# Altium footprint library Package_DFN_QFN.PcbLib: 735 footprints (part 45 of 46)
Each footprint in its own frame and in the unit in brackets; x right, y up, seen from the top. Pads: shape width x height; smd on the part's side, far side on the other; paste and mask are expansions set on the pad; w line width, h text height; cw(c..) or ccw(c..) is an arc to the next point about the centre after c.
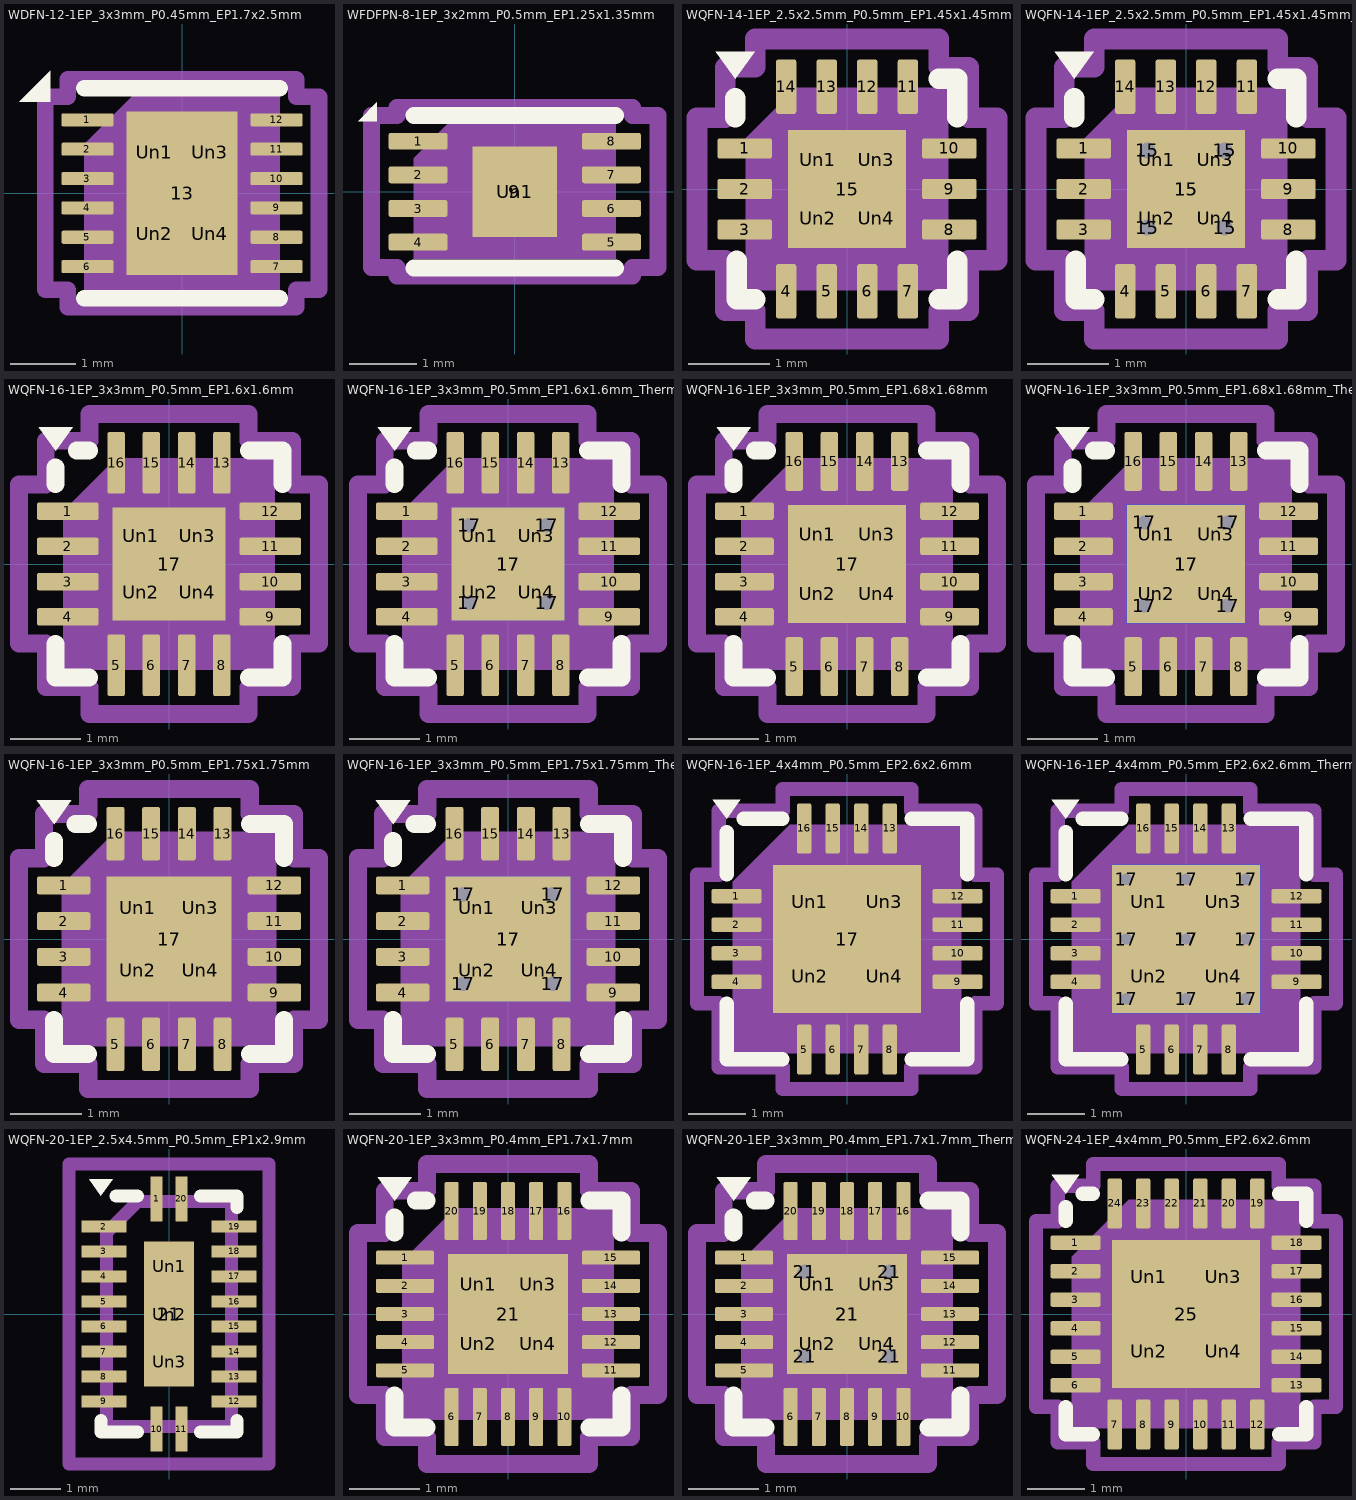
[diagram p44: the footprints below, top view; thin cyan lines are the x and y axes]

## WDFN-12-1EP_3x3mm_P0.45mm_EP1.7x2.5mm [mm] "WDFN-12-1EP_3x3mm_P0.45mm_EP1.7x2.5mm"
pads (17):
  rrect25% 0.8x0.2 smd: 1(-1.45,1.125) 2(-1.45,0.675) 3(-1.45,0.225) 4(-1.45,-0.225) 5(-1.45,-0.675) 6(-1.45,-1.125) 7(1.45,-1.125) 8(1.45,-0.675) 9(1.45,-0.225) 10(1.45,0.225) 11(1.45,0.675) 12(1.45,1.125)
  rect 1.7x2.5 smd: 13(0,0)
  rrect25% 0.69x1.01 on Top Paste: Un1(-0.425,0.625) Un2(-0.425,-0.625) Un3(0.425,0.625) Un4(0.425,-0.625)
F.SilkS:
  region: -2.02,1.4 -2.5,1.4 -2.02,1.88
  lines w0.254: -1.5,-1.61 1.5,-1.61 ; -1.5,1.61 1.5,1.61
Top Component Center:
  lines w0.127: -0.127,0 0.127,0 -0.127,0 ; 0,-0.127 0,0.127 0,-0.127
Top Assembly:
  region: 1.5,-1.5 -1.5,-1.5 -1.5,0.75 -0.75,1.5 1.5,1.5
Top Courtyard:
  lines w0.254: -2.1,-1.48 -1.75,-1.48 -1.75,-1.75 1.75,-1.75 1.75,-1.48 2.1,-1.48 2.1,1.48 1.75,1.48 1.75,1.75 -1.75,1.75 -1.75,1.48 -2.1,1.48 -2.1,-1.48
Top Designator:
  text ".Designator" at -3.43,-0.344 h1.52

## WFDFPN-8-1EP_3x2mm_P0.5mm_EP1.25x1.35mm [mm] "WFDFPN-8-1EP_3x2mm_P0.5mm_EP1.25x1.35mm"
pads (10):
  rrect25% 0.875x0.25 smd: 1(-1.438,0.75) 2(-1.438,0.25) 3(-1.438,-0.25) 4(-1.438,-0.75) 5(1.438,-0.75) 6(1.438,-0.25) 7(1.438,0.25) 8(1.438,0.75)
  rect 1.25x1.35 smd: 9(0,0)
  rrect25% 1.01x1.09 on Top Paste: Un1(0,0)
F.SilkS:
  region: -2.05,1.05 -2.33,1.05 -2.05,1.33
  lines w0.254: -1.5,-1.135 1.5,-1.135 ; -1.5,1.135 1.5,1.135
Top Component Center:
  lines w0.127: -0.127,0 0.127,0 -0.127,0 ; 0,-0.127 0,0.127 0,-0.127
Top Assembly:
  region: 1.5,-1 -1.5,-1 -1.5,0.5 -1,1 1.5,1
Top Courtyard:
  lines w0.254: -2.13,-1.13 -1.75,-1.13 -1.75,-1.25 1.75,-1.25 1.75,-1.13 2.13,-1.13 2.13,1.13 1.75,1.13 1.75,1.25 -1.75,1.25 -1.75,1.13 -2.13,1.13 -2.13,-1.13
Top Designator:
  text ".Designator" at -3.43,-0.344 h1.52

## WQFN-14-1EP_2.5x2.5mm_P0.5mm_EP1.45x1.45mm [mm] "WQFN-14-1EP_2.5x2.5mm_P0.5mm_EP1.45x1.45mm"
pads (19):
  rrect25% 0.675x0.25 smd: 1(-1.262,0.5) 2(-1.262,0) 3(-1.262,-0.5) 8(1.262,-0.5) 9(1.262,0) 10(1.262,0.5)
  rrect25% 0.25x0.675 smd: 4(-0.75,-1.262) 5(-0.25,-1.262) 6(0.25,-1.262) 7(0.75,-1.262) 11(0.75,1.262) 12(0.25,1.262) 13(-0.25,1.262) 14(-0.75,1.262)
  rect 1.45x1.45 smd: 15(0,0)
  rrect25% 0.58x0.58 on Top Paste: Un1(-0.36,0.36) Un2(-0.36,-0.36) Un3(0.36,0.36) Un4(0.36,-0.36)
F.SilkS:
  region: -1.38,1.36 -1.62,1.69 -1.14,1.69
  lines w0.254: -1.38,0.885 -1.38,1.12 ; -1.36,-0.885 -1.36,-1.36 -1.135,-1.36 ; 1.135,-1.36 1.36,-1.36 1.36,-0.885 ; 1.135,1.36 1.36,1.36 1.36,0.885
Top Component Center:
  lines w0.127: -0.127,0 0.127,0 -0.127,0 ; 0,-0.127 0,0.127 0,-0.127
Top Assembly:
  region: 1.25,-1.25 -1.25,-1.25 -1.25,0.625 -0.625,1.25 1.25,1.25
Top Courtyard:
  lines w0.254: -1.85,-0.88 -1.5,-0.88 -1.5,-1.5 -1.13,-1.5 -1.13,-1.85 1.13,-1.85 1.13,-1.5 1.5,-1.5 1.5,-0.88 1.85,-0.88 1.85,0.88 1.5,0.88 1.5,1.5 1.13,1.5 1.13,1.85 -1.13,1.85 -1.13,1.5 -1.5,1.5 -1.5,0.88 -1.85,0.88 -1.85,-0.88
Top Designator:
  text ".Designator" at -2.251,-0.226 h1

## WQFN-14-1EP_2.5x2.5mm_P0.5mm_EP1.45x1.45mm_ThermalVias [mm] "WQFN-14-1EP_2.5x2.5mm_P0.5mm_EP1.45x1.45mm_ThermalVias"
pads (24):
  rrect25% 0.675x0.25 smd: 1(-1.262,0.5) 2(-1.262,0) 3(-1.262,-0.5) 8(1.262,-0.5) 9(1.262,0) 10(1.262,0.5)
  rrect25% 0.25x0.675 smd: 4(-0.75,-1.262) 5(-0.25,-1.262) 6(0.25,-1.262) 7(0.75,-1.262) 11(0.75,1.262) 12(0.25,1.262) 13(-0.25,1.262) 14(-0.75,1.262)
  round 0.5 hole 0.2: 15(-0.475,-0.475) 15(-0.475,0.475) 15(0.475,-0.475) 15(0.475,0.475)
  rect 1.45x1.45 smd: 15(0,0)
  rect 1.45x1.45 smd far side: 15(0,0)
  rrect25% 0.61x0.61 on Top Paste: Un1(-0.36,0.36) Un2(-0.36,-0.36) Un3(0.36,0.36) Un4(0.36,-0.36)
F.SilkS:
  region: -1.38,1.36 -1.62,1.69 -1.14,1.69
  lines w0.254: -1.38,0.885 -1.38,1.12 ; -1.36,-0.885 -1.36,-1.36 -1.135,-1.36 ; 1.135,-1.36 1.36,-1.36 1.36,-0.885 ; 1.135,1.36 1.36,1.36 1.36,0.885
Top Component Center:
  lines w0.127: -0.127,0 0.127,0 -0.127,0 ; 0,-0.127 0,0.127 0,-0.127
Top Assembly:
  region: 1.25,-1.25 -1.25,-1.25 -1.25,0.625 -0.625,1.25 1.25,1.25
Top Courtyard:
  lines w0.254: -1.85,-0.88 -1.5,-0.88 -1.5,-1.5 -1.13,-1.5 -1.13,-1.85 1.13,-1.85 1.13,-1.5 1.5,-1.5 1.5,-0.88 1.85,-0.88 1.85,0.88 1.5,0.88 1.5,1.5 1.13,1.5 1.13,1.85 -1.13,1.85 -1.13,1.5 -1.5,1.5 -1.5,0.88 -1.85,0.88 -1.85,-0.88
Top Designator:
  text ".Designator" at -3.43,-0.344 h1.52

## WQFN-16-1EP_3x3mm_P0.5mm_EP1.6x1.6mm [mm] "WQFN-16-1EP_3x3mm_P0.5mm_EP1.6x1.6mm"
pads (21):
  rrect25% 0.875x0.25 smd: 1(-1.438,0.75) 2(-1.438,0.25) 3(-1.438,-0.25) 4(-1.438,-0.75) 9(1.438,-0.75) 10(1.438,-0.25) 11(1.438,0.25) 12(1.438,0.75)
  rrect25% 0.25x0.875 smd: 5(-0.75,-1.438) 6(-0.25,-1.438) 7(0.25,-1.438) 8(0.75,-1.438) 13(0.75,1.438) 14(0.25,1.438) 15(-0.25,1.438) 16(-0.75,1.438)
  rect 1.6x1.6 smd: 17(0,0)
  rrect25% 0.64x0.64 on Top Paste: Un1(-0.4,0.4) Un2(-0.4,-0.4) Un3(0.4,0.4) Un4(0.4,-0.4)
F.SilkS:
  region: -1.61,1.61 -1.85,1.94 -1.37,1.94
  lines w0.254: -1.61,-1.135 -1.61,-1.61 -1.135,-1.61 ; -1.61,1.135 -1.61,1.37 ; -1.31,1.61 -1.135,1.61 ; 1.135,-1.61 1.61,-1.61 1.61,-1.135 ; 1.135,1.61 1.61,1.61 1.61,1.135
Top Component Center:
  lines w0.127: -0.127,0 0.127,0 -0.127,0 ; 0,-0.127 0,0.127 0,-0.127
Top Assembly:
  region: 1.5,-1.5 -1.5,-1.5 -1.5,0.75 -0.75,1.5 1.5,1.5
Top Courtyard:
  lines w0.254: -2.13,-1.13 -2.13,1.13 -1.75,1.13 -1.75,1.75 -1.13,1.75 -1.13,2.13 1.13,2.13 1.13,1.75 1.75,1.75 1.75,1.13 2.13,1.13 2.13,-1.13 1.75,-1.13 1.75,-1.75 1.13,-1.75 1.13,-2.13 -1.13,-2.13 -1.13,-1.75 -1.75,-1.75 -1.75,-1.13 -2.13,-1.13
Top Designator:
  text ".Designator" at -3.43,-0.344 h1.52
3D body "WQFN-16-1EP_3x3mm_P0.5mm_EP1.6x1.6mm.step": height 0.8, standoff 0, extent -1.5,-1.5 1.5,1.5

## WQFN-16-1EP_3x3mm_P0.5mm_EP1.6x1.6mm_ThermalVias [mm] "WQFN-16-1EP_3x3mm_P0.5mm_EP1.6x1.6mm_ThermalVias"
pads (26):
  rrect25% 0.875x0.25 smd: 1(-1.438,0.75) 2(-1.438,0.25) 3(-1.438,-0.25) 4(-1.438,-0.75) 9(1.438,-0.75) 10(1.438,-0.25) 11(1.438,0.25) 12(1.438,0.75)
  rrect25% 0.25x0.875 smd: 5(-0.75,-1.438) 6(-0.25,-1.438) 7(0.25,-1.438) 8(0.75,-1.438) 13(0.75,1.438) 14(0.25,1.438) 15(-0.25,1.438) 16(-0.75,1.438)
  round 0.5 hole 0.2: 17(-0.55,-0.55) 17(-0.55,0.55) 17(0.55,-0.55) 17(0.55,0.55)
  rect 1.6x1.6 smd: 17(0,0)
  rect 1.6x1.6 smd far side: 17(0,0)
  rrect25% 0.69x0.69 on Top Paste: Un1(-0.4,0.4) Un2(-0.4,-0.4) Un3(0.4,0.4) Un4(0.4,-0.4)
F.SilkS:
  region: -1.61,1.61 -1.85,1.94 -1.37,1.94
  lines w0.254: -1.61,-1.135 -1.61,-1.61 -1.135,-1.61 ; -1.61,1.135 -1.61,1.37 ; -1.31,1.61 -1.135,1.61 ; 1.135,-1.61 1.61,-1.61 1.61,-1.135 ; 1.135,1.61 1.61,1.61 1.61,1.135
Top Component Center:
  lines w0.127: -0.127,0 0.127,0 -0.127,0 ; 0,-0.127 0,0.127 0,-0.127
Top Assembly:
  region: 1.5,-1.5 -1.5,-1.5 -1.5,0.75 -0.75,1.5 1.5,1.5
Top Courtyard:
  lines w0.254: -2.13,-1.13 -1.75,-1.13 -1.75,-1.75 -1.13,-1.75 -1.13,-2.13 1.13,-2.13 1.13,-1.75 1.75,-1.75 1.75,-1.13 2.13,-1.13 2.13,1.13 1.75,1.13 1.75,1.75 1.13,1.75 1.13,2.13 -1.13,2.13 -1.13,1.75 -1.75,1.75 -1.75,1.13 -2.13,1.13 -2.13,-1.13
Top Designator:
  text ".Designator" at -3.43,-0.344 h1.52
3D body "WQFN-16-1EP_3x3mm_P0.5mm_EP1.6x1.6mm.step": height 0.8, standoff 0, extent -1.5,-1.5 1.5,1.5

## WQFN-16-1EP_3x3mm_P0.5mm_EP1.68x1.68mm [mm] "WQFN-16-1EP_3x3mm_P0.5mm_EP1.68x1.68mm"
pads (21):
  rrect25% 0.835x0.25 smd: 1(-1.458,0.75) 2(-1.458,0.25) 3(-1.458,-0.25) 4(-1.458,-0.75) 9(1.458,-0.75) 10(1.458,-0.25) 11(1.458,0.25) 12(1.458,0.75)
  rrect25% 0.25x0.835 smd: 5(-0.75,-1.458) 6(-0.25,-1.458) 7(0.25,-1.458) 8(0.75,-1.458) 13(0.75,1.458) 14(0.25,1.458) 15(-0.25,1.458) 16(-0.75,1.458)
  rect 1.68x1.68 smd: 17(0,0)
  rrect25% 0.68x0.68 on Top Paste: Un1(-0.42,0.42) Un2(-0.42,-0.42) Un3(0.42,0.42) Un4(0.42,-0.42)
F.SilkS:
  region: -1.61,1.61 -1.85,1.94 -1.37,1.94
  lines w0.254: -1.61,-1.135 -1.61,-1.61 -1.135,-1.61 ; -1.61,1.135 -1.61,1.37 ; -1.31,1.61 -1.135,1.61 ; 1.135,-1.61 1.61,-1.61 1.61,-1.135 ; 1.135,1.61 1.61,1.61 1.61,1.135
Top Component Center:
  lines w0.127: -0.127,0 0.127,0 -0.127,0 ; 0,-0.127 0,0.127 0,-0.127
Top Assembly:
  region: 1.5,-1.5 -1.5,-1.5 -1.5,0.75 -0.75,1.5 1.5,1.5
Top Courtyard:
  lines w0.254: -2.13,-1.13 -1.75,-1.13 -1.75,-1.75 -1.13,-1.75 -1.13,-2.13 1.13,-2.13 1.13,-1.75 1.75,-1.75 1.75,-1.13 2.13,-1.13 2.13,1.13 1.75,1.13 1.75,1.75 1.13,1.75 1.13,2.13 -1.13,2.13 -1.13,1.75 -1.75,1.75 -1.75,1.13 -2.13,1.13 -2.13,-1.13
Top Designator:
  text ".Designator" at -3.43,-0.344 h1.52
3D body "WQFN-16-1EP_3x3mm_P0.5mm_EP1.6x1.6mm.step": height 0.8, standoff 0, extent -1.5,-1.5 1.5,1.5

## WQFN-16-1EP_3x3mm_P0.5mm_EP1.68x1.68mm_ThermalVias [mm] "WQFN-16-1EP_3x3mm_P0.5mm_EP1.68x1.68mm_ThermalVias"
pads (26):
  rrect25% 0.835x0.25 smd: 1(-1.458,0.75) 2(-1.458,0.25) 3(-1.458,-0.25) 4(-1.458,-0.75) 9(1.458,-0.75) 10(1.458,-0.25) 11(1.458,0.25) 12(1.458,0.75)
  rrect25% 0.25x0.835 smd: 5(-0.75,-1.458) 6(-0.25,-1.458) 7(0.25,-1.458) 8(0.75,-1.458) 13(0.75,1.458) 14(0.25,1.458) 15(-0.25,1.458) 16(-0.75,1.458)
  round 0.5 hole 0.2: 17(-0.59,-0.59) 17(-0.59,0.59) 17(0.59,-0.59) 17(0.59,0.59)
  rect 1.68x1.68 smd: 17(0,0)
  rect 1.68x1.68 smd far side: 17(0,0)
  rrect25% 0.73x0.73 on Top Paste: Un1(-0.42,0.42) Un2(-0.42,-0.42) Un3(0.42,0.42) Un4(0.42,-0.42)
F.SilkS:
  region: -1.61,1.61 -1.85,1.94 -1.37,1.94
  lines w0.254: -1.61,-1.135 -1.61,-1.61 -1.135,-1.61 ; -1.61,1.135 -1.61,1.37 ; -1.31,1.61 -1.135,1.61 ; 1.135,-1.61 1.61,-1.61 1.61,-1.135 ; 1.135,1.61 1.61,1.61 1.61,1.135
Top Component Center:
  lines w0.127: -0.127,0 0.127,0 -0.127,0 ; 0,-0.127 0,0.127 0,-0.127
Top Assembly:
  region: 1.5,-1.5 -1.5,-1.5 -1.5,0.75 -0.75,1.5 1.5,1.5
Top Courtyard:
  lines w0.254: -2.13,-1.13 -1.75,-1.13 -1.75,-1.75 -1.13,-1.75 -1.13,-2.13 1.13,-2.13 1.13,-1.75 1.75,-1.75 1.75,-1.13 2.13,-1.13 2.13,1.13 1.75,1.13 1.75,1.75 1.13,1.75 1.13,2.13 -1.13,2.13 -1.13,1.75 -1.75,1.75 -1.75,1.13 -2.13,1.13 -2.13,-1.13
Top Designator:
  text ".Designator" at -3.43,-0.344 h1.52
3D body "WQFN-16-1EP_3x3mm_P0.5mm_EP1.6x1.6mm.step": height 0.8, standoff 0, extent -1.5,-1.5 1.5,1.5

## WQFN-16-1EP_3x3mm_P0.5mm_EP1.75x1.75mm [mm] "WQFN-16-1EP_3x3mm_P0.5mm_EP1.75x1.75mm"
pads (21):
  rrect25% 0.75x0.25 smd: 1(-1.475,0.75) 2(-1.475,0.25) 3(-1.475,-0.25) 4(-1.475,-0.75) 9(1.475,-0.75) 10(1.475,-0.25) 11(1.475,0.25) 12(1.475,0.75)
  rrect25% 0.25x0.75 smd: 5(-0.75,-1.475) 6(-0.25,-1.475) 7(0.25,-1.475) 8(0.75,-1.475) 13(0.75,1.475) 14(0.25,1.475) 15(-0.25,1.475) 16(-0.75,1.475)
  rect 1.75x1.75 smd: 17(0,0)
  rrect25% 0.71x0.71 on Top Paste: Un1(-0.44,0.44) Un2(-0.44,-0.44) Un3(0.44,0.44) Un4(0.44,-0.44)
F.SilkS:
  region: -1.61,1.61 -1.85,1.94 -1.37,1.94
  lines w0.254: -1.61,-1.135 -1.61,-1.61 -1.135,-1.61 ; -1.61,1.135 -1.61,1.37 ; -1.31,1.61 -1.135,1.61 ; 1.135,-1.61 1.61,-1.61 1.61,-1.135 ; 1.135,1.61 1.61,1.61 1.61,1.135
Top Component Center:
  lines w0.127: -0.127,0 0.127,0 -0.127,0 ; 0,-0.127 0,0.127 0,-0.127
Top Assembly:
  region: 1.5,-1.5 -1.5,-1.5 -1.5,0.75 -0.75,1.5 1.5,1.5
Top Courtyard:
  lines w0.254: -2.1,-1.13 -1.75,-1.13 -1.75,-1.75 -1.13,-1.75 -1.13,-2.1 1.13,-2.1 1.13,-1.75 1.75,-1.75 1.75,-1.13 2.1,-1.13 2.1,1.13 1.75,1.13 1.75,1.75 1.13,1.75 1.13,2.1 -1.13,2.1 -1.13,1.75 -1.75,1.75 -1.75,1.13 -2.1,1.13 -2.1,-1.13
Top Designator:
  text ".Designator" at -3.43,-0.344 h1.52
3D body "WQFN-16-1EP_3x3mm_P0.5mm_EP1.6x1.6mm.step": height 0.8, standoff 0, extent -1.5,-1.5 1.5,1.5

## WQFN-16-1EP_3x3mm_P0.5mm_EP1.75x1.75mm_ThermalVias [mm] "WQFN-16-1EP_3x3mm_P0.5mm_EP1.75x1.75mm_ThermalVias"
pads (26):
  rrect25% 0.75x0.25 smd: 1(-1.475,0.75) 2(-1.475,0.25) 3(-1.475,-0.25) 4(-1.475,-0.75) 9(1.475,-0.75) 10(1.475,-0.25) 11(1.475,0.25) 12(1.475,0.75)
  rrect25% 0.25x0.75 smd: 5(-0.75,-1.475) 6(-0.25,-1.475) 7(0.25,-1.475) 8(0.75,-1.475) 13(0.75,1.475) 14(0.25,1.475) 15(-0.25,1.475) 16(-0.75,1.475)
  round 0.5 hole 0.2: 17(-0.625,-0.625) 17(-0.625,0.625) 17(0.625,-0.625) 17(0.625,0.625)
  rect 1.75x1.75 smd: 17(0,0)
  rect 1.75x1.75 smd far side: 17(0,0)
  rrect25% 0.76x0.76 on Top Paste: Un1(-0.44,0.44) Un2(-0.44,-0.44) Un3(0.44,0.44) Un4(0.44,-0.44)
F.SilkS:
  region: -1.61,1.61 -1.85,1.94 -1.37,1.94
  lines w0.254: -1.61,-1.135 -1.61,-1.61 -1.135,-1.61 ; -1.61,1.135 -1.61,1.37 ; -1.31,1.61 -1.135,1.61 ; 1.135,-1.61 1.61,-1.61 1.61,-1.135 ; 1.135,1.61 1.61,1.61 1.61,1.135
Top Component Center:
  lines w0.127: -0.127,0 0.127,0 -0.127,0 ; 0,-0.127 0,0.127 0,-0.127
Top Assembly:
  region: 1.5,-1.5 -1.5,-1.5 -1.5,0.75 -0.75,1.5 1.5,1.5
Top Courtyard:
  lines w0.254: -2.1,-1.13 -1.75,-1.13 -1.75,-1.75 -1.13,-1.75 -1.13,-2.1 1.13,-2.1 1.13,-1.75 1.75,-1.75 1.75,-1.13 2.1,-1.13 2.1,1.13 1.75,1.13 1.75,1.75 1.13,1.75 1.13,2.1 -1.13,2.1 -1.13,1.75 -1.75,1.75 -1.75,1.13 -2.1,1.13 -2.1,-1.13
Top Designator:
  text ".Designator" at -3.43,-0.344 h1.52
3D body "WQFN-16-1EP_3x3mm_P0.5mm_EP1.6x1.6mm.step": height 0.8, standoff 0, extent -1.5,-1.5 1.5,1.5

## WQFN-16-1EP_4x4mm_P0.5mm_EP2.6x2.6mm [mm] "WQFN-16-1EP_4x4mm_P0.5mm_EP2.6x2.6mm"
pads (21):
  rrect25% 0.875x0.25 smd: 1(-1.937,0.75) 2(-1.937,0.25) 3(-1.937,-0.25) 4(-1.937,-0.75) 9(1.937,-0.75) 10(1.937,-0.25) 11(1.937,0.25) 12(1.937,0.75)
  rrect25% 0.25x0.875 smd: 5(-0.75,-1.937) 6(-0.25,-1.937) 7(0.25,-1.937) 8(0.75,-1.937) 13(0.75,1.937) 14(0.25,1.937) 15(-0.25,1.937) 16(-0.75,1.937)
  rect 2.6x2.6 smd: 17(0,0)
  rrect24% 1.05x1.05 on Top Paste: Un1(-0.65,0.65) Un2(-0.65,-0.65) Un3(0.65,0.65) Un4(0.65,-0.65)
F.SilkS:
  region: -2.11,2.11 -2.35,2.44 -1.87,2.44
  lines w0.254: -2.11,-1.135 -2.11,-2.11 -1.135,-2.11 ; -2.11,1.135 -2.11,1.87 ; -1.81,2.11 -1.135,2.11 ; 1.135,-2.11 2.11,-2.11 2.11,-1.135 ; 1.135,2.11 2.11,2.11 2.11,1.135
Top Component Center:
  lines w0.127: -0.127,0 0.127,0 -0.127,0 ; 0,-0.127 0,0.127 0,-0.127
Top Assembly:
  region: 2,-2 -2,-2 -2,1 -1,2 2,2
Top Courtyard:
  lines w0.254: -2.63,-1.13 -2.25,-1.13 -2.25,-2.25 -1.13,-2.25 -1.13,-2.63 1.13,-2.63 1.13,-2.25 2.25,-2.25 2.25,-1.13 2.63,-1.13 2.63,1.13 2.25,1.13 2.25,2.25 1.13,2.25 1.13,2.63 -1.13,2.63 -1.13,2.25 -2.25,2.25 -2.25,1.13 -2.63,1.13 -2.63,-1.13
Top Designator:
  text ".Designator" at -3.43,-0.344 h1.52

## WQFN-16-1EP_4x4mm_P0.5mm_EP2.6x2.6mm_ThermalVias [mm] "WQFN-16-1EP_4x4mm_P0.5mm_EP2.6x2.6mm_ThermalVias"
pads (31):
  rrect25% 0.875x0.25 smd: 1(-1.937,0.75) 2(-1.937,0.25) 3(-1.937,-0.25) 4(-1.937,-0.75) 9(1.937,-0.75) 10(1.937,-0.25) 11(1.937,0.25) 12(1.937,0.75)
  rrect25% 0.25x0.875 smd: 5(-0.75,-1.937) 6(-0.25,-1.937) 7(0.25,-1.937) 8(0.75,-1.937) 13(0.75,1.937) 14(0.25,1.937) 15(-0.25,1.937) 16(-0.75,1.937)
  round 0.5 hole 0.2: 17(-1.05,-1.05) 17(-1.05,0) 17(-1.05,1.05) 17(0,-1.05) 17(0,0) 17(0,1.05) 17(1.05,-1.05) 17(1.05,0) 17(1.05,1.05)
  rect 2.6x2.6 smd: 17(0,0)
  rect 2.6x2.6 smd far side: 17(0,0)
  rrect22% 1.13x1.13 on Top Paste: Un1(-0.65,0.65) Un2(-0.65,-0.65) Un3(0.65,0.65) Un4(0.65,-0.65)
F.SilkS:
  region: -2.11,2.11 -2.35,2.44 -1.87,2.44
  lines w0.254: -2.11,-1.135 -2.11,-2.11 -1.135,-2.11 ; -2.11,1.135 -2.11,1.87 ; -1.81,2.11 -1.135,2.11 ; 1.135,-2.11 2.11,-2.11 2.11,-1.135 ; 1.135,2.11 2.11,2.11 2.11,1.135
Top Component Center:
  lines w0.127: -0.127,0 0.127,0 -0.127,0 ; 0,-0.127 0,0.127 0,-0.127
Top Assembly:
  region: 2,-2 -2,-2 -2,1 -1,2 2,2
Top Courtyard:
  lines w0.254: -2.63,-1.13 -2.25,-1.13 -2.25,-2.25 -1.13,-2.25 -1.13,-2.63 1.13,-2.63 1.13,-2.25 2.25,-2.25 2.25,-1.13 2.63,-1.13 2.63,1.13 2.25,1.13 2.25,2.25 1.13,2.25 1.13,2.63 -1.13,2.63 -1.13,2.25 -2.25,2.25 -2.25,1.13 -2.63,1.13 -2.63,-1.13
Top Designator:
  text ".Designator" at -3.43,-0.344 h1.52

## WQFN-20-1EP_2.5x4.5mm_P0.5mm_EP1x2.9mm [mm] "WQFN-20-1EP_2.5x4.5mm_P0.5mm_EP1x2.9mm"
pads (24):
  rect 0.24x0.9 smd: 1(-0.25,2.3) 10(-0.25,-2.3) 11(0.25,-2.3) 20(0.25,2.3)
  rect 0.9x0.24 smd: 2(-1.3,1.75) 3(-1.3,1.25) 4(-1.3,0.75) 5(-1.3,0.25) 6(-1.3,-0.25) 7(-1.3,-0.75) 8(-1.3,-1.25) 9(-1.3,-1.75) 12(1.3,-1.75) 13(1.3,-1.25) 14(1.3,-0.75) 15(1.3,-0.25) 16(1.3,0.25) 17(1.3,0.75) 18(1.3,1.25) 19(1.3,1.75)
  rect 1x2.9 smd: 21(0,0)
  rect 0.8x0.8 on Top Paste: Un1(0,0.95) Un2(0,0) Un3(0,-0.95)
F.SilkS:
  region: -1.36,2.36 -1.6,2.69 -1.12,2.69
  lines w0.254: -1.36,-2.13 -1.36,-2.36 -0.63,-2.36 ; -1.06,2.36 -0.63,2.36 ; 0.63,-2.36 1.36,-2.36 1.36,-2.13 ; 0.63,2.36 1.36,2.36 1.36,2.13
Top Component Center:
  lines w0.127: -0.127,0 0.127,0 -0.127,0 ; 0,-0.127 0,0.127 0,-0.127
Top Assembly:
  lines w0.254: -1.25,-2.25 1.25,-2.25 1.25,2.25 -0.625,2.25 -1.25,1.625 -1.25,-2.25
Top Courtyard:
  lines w0.254: -2,-3 2,-3 2,3 -2,3 -2,-3
Top Designator:
  text ".Designator" at -3.43,-0.344 h1.52
3D body "WQFN-20-1EP_2.5x4.5mm_P0.5mm_EP1x2.9mm.step": height 0.8, standoff 0, extent -1.25,-2.25 1.25,2.25

## WQFN-20-1EP_3x3mm_P0.4mm_EP1.7x1.7mm [mm] "WQFN-20-1EP_3x3mm_P0.4mm_EP1.7x1.7mm"
pads (25):
  rrect25% 0.825x0.2 smd: 1(-1.462,0.8) 2(-1.462,0.4) 3(-1.462,0) 4(-1.462,-0.4) 5(-1.462,-0.8) 11(1.462,-0.8) 12(1.462,-0.4) 13(1.462,0) 14(1.462,0.4) 15(1.462,0.8)
  rrect25% 0.2x0.825 smd: 6(-0.8,-1.462) 7(-0.4,-1.462) 8(0,-1.462) 9(0.4,-1.462) 10(0.8,-1.462) 16(0.8,1.462) 17(0.4,1.462) 18(0,1.462) 19(-0.4,1.462) 20(-0.8,1.462)
  rect 1.7x1.7 smd: 21(0,0)
  rrect25% 0.69x0.69 on Top Paste: Un1(-0.425,0.425) Un2(-0.425,-0.425) Un3(0.425,0.425) Un4(0.425,-0.425)
F.SilkS:
  region: -1.61,1.61 -1.85,1.94 -1.37,1.94
  lines w0.254: -1.61,-1.16 -1.61,-1.61 -1.16,-1.61 ; -1.61,1.16 -1.61,1.37 ; -1.31,1.61 -1.16,1.61 ; 1.16,-1.61 1.61,-1.61 1.61,-1.16 ; 1.16,1.61 1.61,1.61 1.61,1.16
Top Component Center:
  lines w0.127: -0.127,0 0.127,0 -0.127,0 ; 0,-0.127 0,0.127 0,-0.127
Top Assembly:
  region: 1.5,-1.5 -1.5,-1.5 -1.5,0.75 -0.75,1.5 1.5,1.5
Top Courtyard:
  lines w0.254: -2.13,-1.15 -1.75,-1.15 -1.75,-1.75 -1.15,-1.75 -1.15,-2.13 1.15,-2.13 1.15,-1.75 1.75,-1.75 1.75,-1.15 2.13,-1.15 2.13,1.15 1.75,1.15 1.75,1.75 1.15,1.75 1.15,2.13 -1.15,2.13 -1.15,1.75 -1.75,1.75 -1.75,1.15 -2.13,1.15 -2.13,-1.15
Top Designator:
  text ".Designator" at -3.43,-0.344 h1.52

## WQFN-20-1EP_3x3mm_P0.4mm_EP1.7x1.7mm_ThermalVias [mm] "WQFN-20-1EP_3x3mm_P0.4mm_EP1.7x1.7mm_ThermalVias"
pads (30):
  rrect25% 0.825x0.2 smd: 1(-1.462,0.8) 2(-1.462,0.4) 3(-1.462,0) 4(-1.462,-0.4) 5(-1.462,-0.8) 11(1.462,-0.8) 12(1.462,-0.4) 13(1.462,0) 14(1.462,0.4) 15(1.462,0.8)
  rrect25% 0.2x0.825 smd: 6(-0.8,-1.462) 7(-0.4,-1.462) 8(0,-1.462) 9(0.4,-1.462) 10(0.8,-1.462) 16(0.8,1.462) 17(0.4,1.462) 18(0,1.462) 19(-0.4,1.462) 20(-0.8,1.462)
  round 0.5 hole 0.2: 21(-0.6,-0.6) 21(-0.6,0.6) 21(0.6,-0.6) 21(0.6,0.6)
  rect 1.7x1.7 smd: 21(0,0)
  rect 1.7x1.7 smd far side: 21(0,0)
  rrect25% 0.69x0.69 on Top Paste: Un1(-0.425,0.425) Un2(-0.425,-0.425) Un3(0.425,0.425) Un4(0.425,-0.425)
F.SilkS:
  region: -1.61,1.61 -1.85,1.94 -1.37,1.94
  lines w0.254: -1.61,-1.16 -1.61,-1.61 -1.16,-1.61 ; -1.61,1.16 -1.61,1.37 ; -1.31,1.61 -1.16,1.61 ; 1.16,-1.61 1.61,-1.61 1.61,-1.16 ; 1.16,1.61 1.61,1.61 1.61,1.16
Top Component Center:
  lines w0.127: -0.127,0 0.127,0 -0.127,0 ; 0,-0.127 0,0.127 0,-0.127
Top Assembly:
  region: 1.5,-1.5 -1.5,-1.5 -1.5,0.75 -0.75,1.5 1.5,1.5
Top Courtyard:
  lines w0.254: -2.13,-1.15 -1.75,-1.15 -1.75,-1.75 -1.15,-1.75 -1.15,-2.13 1.15,-2.13 1.15,-1.75 1.75,-1.75 1.75,-1.15 2.13,-1.15 2.13,1.15 1.75,1.15 1.75,1.75 1.15,1.75 1.15,2.13 -1.15,2.13 -1.15,1.75 -1.75,1.75 -1.75,1.15 -2.13,1.15 -2.13,-1.15
Top Designator:
  text ".Designator" at -3.43,-0.344 h1.52

## WQFN-24-1EP_4x4mm_P0.5mm_EP2.6x2.6mm [mm] "WQFN-24-1EP_4x4mm_P0.5mm_EP2.6x2.6mm"
pads (29):
  rrect25% 0.875x0.25 smd: 1(-1.937,1.25) 2(-1.937,0.75) 3(-1.937,0.25) 4(-1.937,-0.25) 5(-1.937,-0.75) 6(-1.937,-1.25) 13(1.937,-1.25) 14(1.937,-0.75) 15(1.937,-0.25) 16(1.937,0.25) 17(1.937,0.75) 18(1.937,1.25)
  rrect25% 0.25x0.875 smd: 7(-1.25,-1.937) 8(-0.75,-1.937) 9(-0.25,-1.937) 10(0.25,-1.937) 11(0.75,-1.937) 12(1.25,-1.937) 19(1.25,1.937) 20(0.75,1.937) 21(0.25,1.937) 22(-0.25,1.937) 23(-0.75,1.937) 24(-1.25,1.937)
  rect 2.6x2.6 smd: 25(0,0)
  rrect24% 1.05x1.05 on Top Paste: Un1(-0.65,0.65) Un2(-0.65,-0.65) Un3(0.65,0.65) Un4(0.65,-0.65)
F.SilkS:
  region: -2.11,2.11 -2.35,2.44 -1.87,2.44
  lines w0.254: -2.11,-1.635 -2.11,-2.11 -1.635,-2.11 ; -2.11,1.635 -2.11,1.87 ; -1.81,2.11 -1.635,2.11 ; 1.635,-2.11 2.11,-2.11 2.11,-1.635 ; 1.635,2.11 2.11,2.11 2.11,1.635
Top Component Center:
  lines w0.127: -0.127,0 0.127,0 -0.127,0 ; 0,-0.127 0,0.127 0,-0.127
Top Assembly:
  region: 2,-2 -2,-2 -2,1 -1,2 2,2
Top Courtyard:
  lines w0.254: -2.63,-1.63 -2.25,-1.63 -2.25,-2.25 -1.63,-2.25 -1.63,-2.63 1.63,-2.63 1.63,-2.25 2.25,-2.25 2.25,-1.63 2.63,-1.63 2.63,1.63 2.25,1.63 2.25,2.25 1.63,2.25 1.63,2.63 -1.63,2.63 -1.63,2.25 -2.25,2.25 -2.25,1.63 -2.63,1.63 -2.63,-1.63
Top Designator:
  text ".Designator" at -3.43,-0.344 h1.52